# Altium footprint library CL31B106KAHNNNE.PcbLib: 3 footprints
Each footprint in its own frame and in the unit in brackets; x right, y up, seen from the top. Pads: shape width x height; smd on the part's side, far side on the other; paste and mask are expansions set on the pad; w line width, h text height; cw(c..) or ccw(c..) is an arc to the next point about the centre after c.
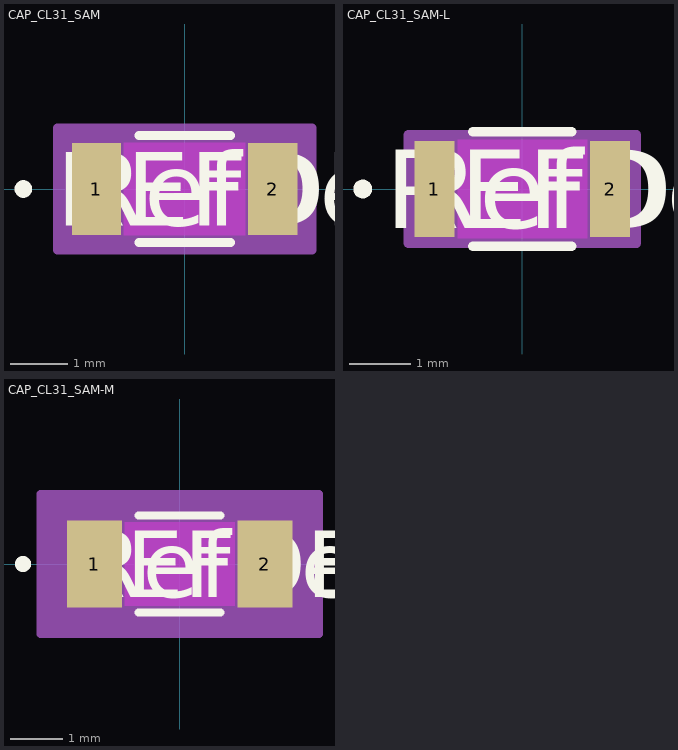
[diagram p0: the footprints below, top view; thin cyan lines are the x and y axes]

## CAP_CL31_SAM [mm]
pads (2):
  rect 0.85x1.6 smd paste+0 mask+0: 1(-1.525,0) 2(1.525,0)
Top Layer keep-out:
  region: -1.049,-0.749 -1.049,0.749 1.049,0.749 1.049,-0.749
Top Overlay:
  circle w0.152: c-2.788,0 r0.076
  lines w0.152: -0.792,-0.927 0.792,-0.927 ; -0.792,0.927 0.792,0.927
  text "RefDes" at -1.905,-0.635 h1.27
  text "REFDES" at -2.222,-0.635 h1.27
Keep-Out Layer:
  region: -1.049,-0.8 -1.049,0.8 1.049,0.8 1.049,-0.8
Mechanical 13:
  circle w0: c-1.398,0 r0.076
  lines w0.025: -1.6,-0.8 -1.6,0.8 ; -1.6,-0.8 -1.1,-0.8 -1.1,0.8 -1.6,0.8 ; -1.6,-0.8 1.6,-0.8 ; -1.6,-0.8 -1.6,0.8 ; -1.6,0.8 1.6,0.8 ; 1.6,-0.8 1.1,-0.8 1.1,0.8 1.6,0.8 ; 1.6,-0.8 1.6,0.8 ; 1.6,-0.8 1.6,0.8
  text "RefDes2" at -2.222,-0.635 h1.27
Mechanical 15:
  region: 2.204,-1.054 -2.204,-1.054 -2.204,1.054 2.204,1.054
  lines w0.152: -2.204,-1.054 -2.204,1.054 2.204,1.054 2.204,-1.054 -2.204,-1.054
3D body "CAP_CL31_SAM.step": height 1, standoff 0, extent -1.6,-0.8 1.6,0.8

## CAP_CL31_SAM-L [mm]
pads (2):
  rect 0.65x1.55 smd paste+0 mask+0: 1(-1.425,0) 2(1.425,0)
Top Layer keep-out:
  region: -1.049,-0.749 -1.049,0.749 1.049,0.749 1.049,-0.749
Top Overlay:
  circle w0.152: c-2.588,0 r0.076
  lines w0.152: -0.804,-0.927 0.804,-0.927 ; -0.804,0.927 0.804,0.927
  text "RefDes" at -1.905,-0.635 h1.27
  text "REFDES" at -2.222,-0.635 h1.27
Keep-Out Layer:
  region: -1.049,-0.8 -1.049,0.8 1.049,0.8 1.049,-0.8
Mechanical 13:
  circle w0: c-1.298,0 r0.076
  lines w0.025: -1.6,-0.8 -1.6,0.8 ; -1.6,-0.8 -1.1,-0.8 -1.1,0.8 -1.6,0.8 ; -1.6,-0.8 1.6,-0.8 ; -1.6,-0.8 -1.6,0.8 ; -1.6,0.8 1.6,0.8 ; 1.6,-0.8 1.1,-0.8 1.1,0.8 1.6,0.8 ; 1.6,-0.8 1.6,0.8 ; 1.6,-0.8 1.6,0.8
  text "RefDes2" at -2.222,-0.635 h1.27
Mechanical 15:
  region: 1.852,-0.877 -1.852,-0.877 -1.852,0.877 1.852,0.877
  lines w0.152: -1.852,-0.877 -1.852,0.877 1.852,0.877 1.852,-0.877 -1.852,-0.877
3D body "CAP_CL31_SAM.step": height 1, standoff 0, extent -1.6,-0.8 1.6,0.8

## CAP_CL31_SAM-M [mm]
pads (2):
  rect 1.05x1.65 smd paste+0 mask+0: 1(-1.625,0) 2(1.625,0)
Top Layer keep-out:
  region: -1.049,-0.749 -1.049,0.749 1.049,0.749 1.049,-0.749
Top Overlay:
  circle w0.152: c-2.988,0 r0.076
  lines w0.152: -0.783,-0.927 0.783,-0.927 ; -0.783,0.927 0.783,0.927
  text "RefDes" at -1.905,-0.635 h1.27
  text "REFDES" at -2.222,-0.635 h1.27
Keep-Out Layer:
  region: -1.049,-0.8 -1.049,0.8 1.049,0.8 1.049,-0.8
Mechanical 13:
  circle w0: c-1.498,0 r0.076
  lines w0.025: -1.6,-0.8 -1.6,0.8 ; -1.6,-0.8 -1.1,-0.8 -1.1,0.8 -1.6,0.8 ; -1.6,-0.8 1.6,-0.8 ; -1.6,-0.8 -1.6,0.8 ; -1.6,0.8 1.6,0.8 ; 1.6,-0.8 1.1,-0.8 1.1,0.8 1.6,0.8 ; 1.6,-0.8 1.6,0.8 ; 1.6,-0.8 1.6,0.8
  text "RefDes2" at -2.222,-0.635 h1.27
Mechanical 15:
  region: 2.658,-1.333 -2.658,-1.333 -2.658,1.333 2.658,1.333
  lines w0.152: -2.658,-1.333 -2.658,1.333 2.658,1.333 2.658,-1.333 -2.658,-1.333
3D body "CAP_CL31_SAM.step": height 1, standoff 0, extent -1.6,-0.8 1.6,0.8